# Altium schematic symbol library Discrete.SchLib: 6 symbols
Pins are listed as number, name and electrical type; pins without a type are passive.

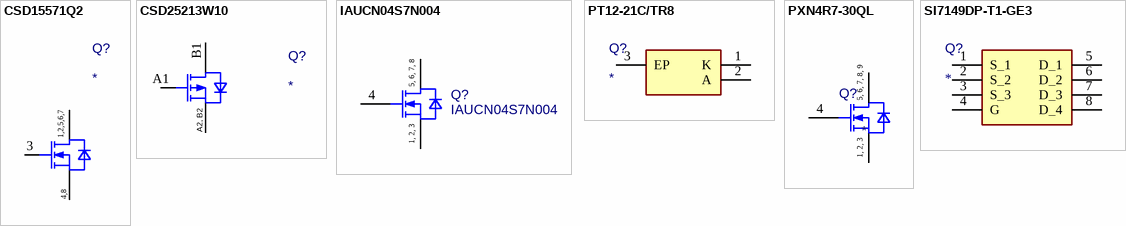
[diagram p0: symbols CSD15571Q2 to SI7149DP-T1-GE3]

## CSD15571Q2
designator Q?
MOSFET 20V N-Channel NexFET Pwr MOSFET; Manufacturer_Name: Texas Instruments; Manufacturer_Part_Number: CSD15571Q2; Datasheet Link: http://www.ti.com/lit/gpn/csd15571q2; Height: 0.8mm; Mouser Part Number: 595-CSD15571Q2; Mouser Price/Stock: https://www.mouser.co.uk/ProductDetail/Texas-Instruments/CSD15571Q2?qs=OGNXFUZBARuNT0xCwaBM7Q%3D%3D; Arrow Part Number: CSD15571Q2; Arrow Price/Stock: https://www.arrow.com/en/products/csd15571q2/texas-instruments
footprint CSD15571Q2
pins: 1 D_1, 2 D_2, 3 G, 4 S_1, 5 D_3, 6 D_4, 7 D_5, 8 S_2
text: 1,2,5,6,7; 4,8

## CSD25213W10
designator Q?
-20-V, P channel NexFET™ power MOSFET, single WLP 1 mm x 1 mm, 47 mOhm, gate ESD protection; MPN: CSD25213W10
footprint CSD25213W10 (2x2 BGA 1mm^2)
pins: A1 Gate, A2 Source, B1 Drain, B2 Source
text: A2, B2

## IAUCN04S7N004
designator Q?
Insulated-Gate Field-Effect Transistor (IGFET), N-Channel, Enhancement, Body Diode, Pin 1 Source, 2 Source, 3 Source, 4 Gate, 5 Drain, 6 Drain, 7 Drain, 8 Drain, 8 Pins; Manufacturer: Infineon Technologies; PackageReference: PG-TDSON-8-53; Manufacturer Order Number: IAUCN04S7N004
footprint INF-PG-TDSON-8-33-V (TDSON 8, 1.27mm pitch; 8 pin,5.15mm W X 5.48mm L X 1.10mm H body)
pins: 1 SOURCE, 2 SOURCE, 3 SOURCE, 4 GATE, 5 DRAIN, 6 DRAIN, 7 DRAIN, 8 DRAIN
text: 5, 6, 7, 8; 1, 2, 3

## PT12-21C/TR8
designator Q?
SENSOR PHOTO 940NM SIDE VIEW SMD; Manufacturer_Name: Kingbright; Manufacturer_Part_Number: APA3010SEC; Datasheet Link: https://eu.mouser.com/datasheet/2/216/APA3010SEC-1658.pdf; Height: 1.15mm; Mouser Part Number: 604-APA3010SEC; Mouser Price/Stock: https://www.mouser.co.uk/ProductDetail/Kingbright/APA3010SEC?qs=SxaZfIVsCL356Ej6LlYSSg%3D%3D
footprint PT12-21C/TR8 (Footprint compatible with APA3010SEC, but with cathode mark on pin 2)
pins: 1 K, 2 A, 3 EP

## PXN4R7-30QL
designator Q?
PXN4R7-30QL / 30 V, N-channel Trench MOSFET
footprint MLPAK33 (SOT8002-1) (for PXN4R7-30QL / 30 V, N-channel Trench MOSFET)
pins: 1 SOURCE, 2 SOURCE, 3 SOURCE, 4 GATE, 5 DRAIN, 6 DRAIN, 7 DRAIN, 8 DRAIN, 9 DRAIN
text: 5, 6, 7, 8, 9; 1, 2, 3

## SI7149DP-T1-GE3
designator Q?
MOSFET (P-Channel); Manufacturer_Name: Vishay; Manufacturer_Part_Number: SI7149DP-T1-GE3; Datasheet Link: https://www.vishay.com/docs/68934/si7149dp.pdf; Mouser Part Number: 781-SI7149DP-GE3; Mouser Price/Stock: https://www.mouser.co.uk/ProductDetail/Vishay-Semiconductors/SI7149DP-T1-GE3?qs=%252BPu8jn5UVnFbGEUOhBqxFg%3D%3D; Arrow Part Number: SI7149DP-T1-GE3; Arrow Price/Stock: https://www.arrow.com/en/products/si7149dp-t1-ge3/vishay
footprint SI7141DPT1GE3
pins: 1 S_1, 2 S_2, 3 S_3, 4 G, 5 D_1, 6 D_2, 7 D_3, 8 D_4